# Altium footprint library Radial2.5_cap.PcbLib: 1 footprints
Each footprint in its own frame and in the unit in brackets; x right, y up, seen from the top. Pads: shape width x height; smd on the part's side, far side on the other; paste and mask are expansions set on the pad; w line width, h text height; cw(c..) or ccw(c..) is an arc to the next point about the centre after c.
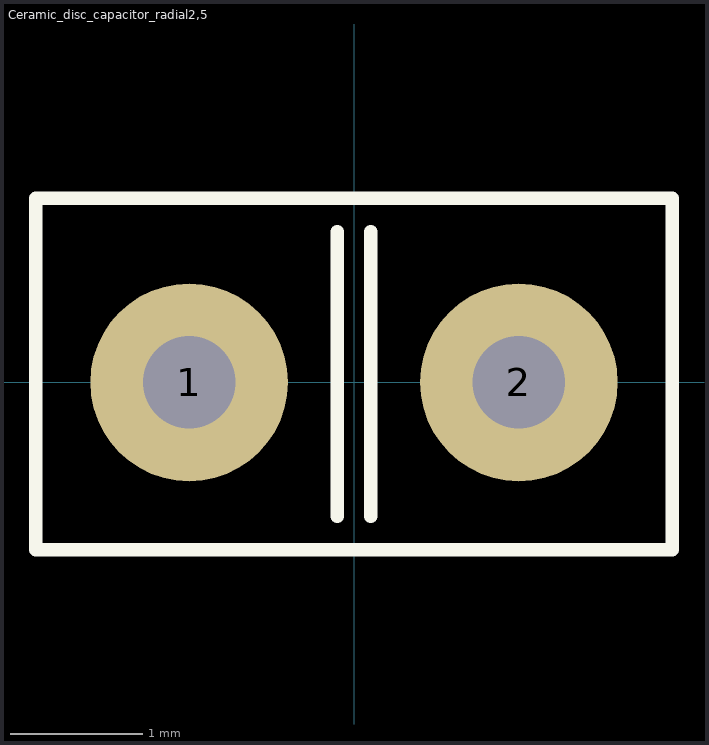
[diagram p0: the footprint, top view; thin cyan lines are the x and y axes]

## Ceramic_disc_capacitor_radial2,5 [mm]
pads (2):
  round 1.5 hole 0.7: 1(-1.25,0) 2(1.25,0)
Top Overlay:
  lines w0.1: -0.127,-1.016 -0.127,0 -0.127,1.143 ; 0.127,-1.016 0.127,0 0.127,1.143 ; -2.413,-1.27 2.413,-1.27 2.413,1.397 -2.413,1.397 -2.413,-1.27
3D body "Cap_Radial2.54.step": height 4.49, standoff -2.5, extent -1.619,-0.49 1.619,0.489